# Altium footprint library ESD122U1W0201E6327XTSA1.PcbLib: 1 footprints
Each footprint in its own frame and in the unit in brackets; x right, y up, seen from the top. Pads: shape width x height; smd on the part's side, far side on the other; paste and mask are expansions set on the pad; w line width, h text height; cw(c..) or ccw(c..) is an arc to the next point about the centre after c.
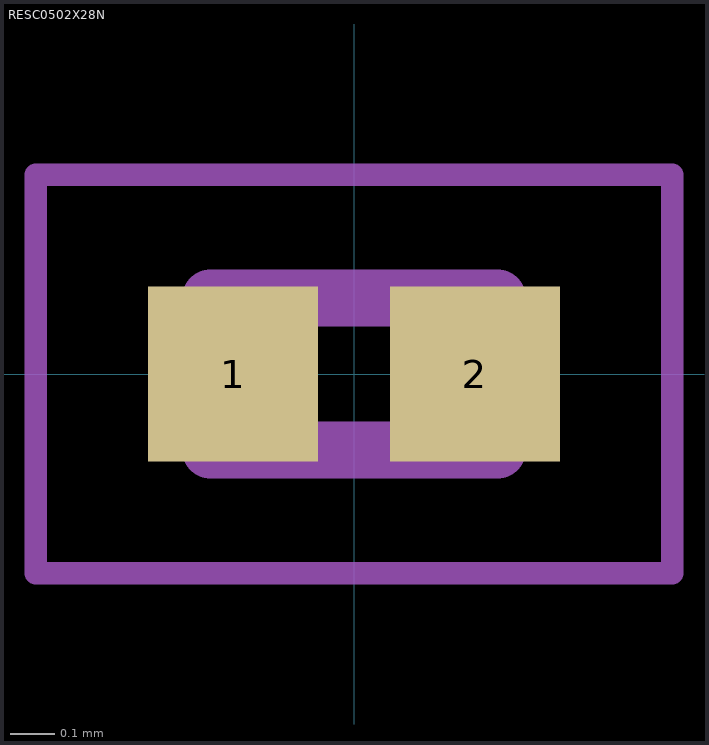
[diagram p0: the footprint, top view; thin cyan lines are the x and y axes]

## RESC0502X28N [mm]
pads (2):
  rect 0.38x0.39 smd: 1(-0.27,0) 2(0.27,0)
Mechanical 13:
  lines w0.127: -0.32,-0.17 0.32,-0.17 0.32,0.17 -0.32,0.17 -0.32,-0.17
Mechanical 15:
  lines w0.05: -0.71,-0.445 0.71,-0.445 0.71,0.445 -0.71,0.445 -0.71,-0.445